# Altium footprint library standard-case.PcbLib: 206 footprints (part 1 of 13)
Each footprint in its own frame and in the unit in brackets; x right, y up, seen from the top. Pads: shape width x height; smd on the part's side, far side on the other; paste and mask are expansions set on the pad; w line width, h text height; cw(c..) or ccw(c..) is an arc to the next point about the centre after c.
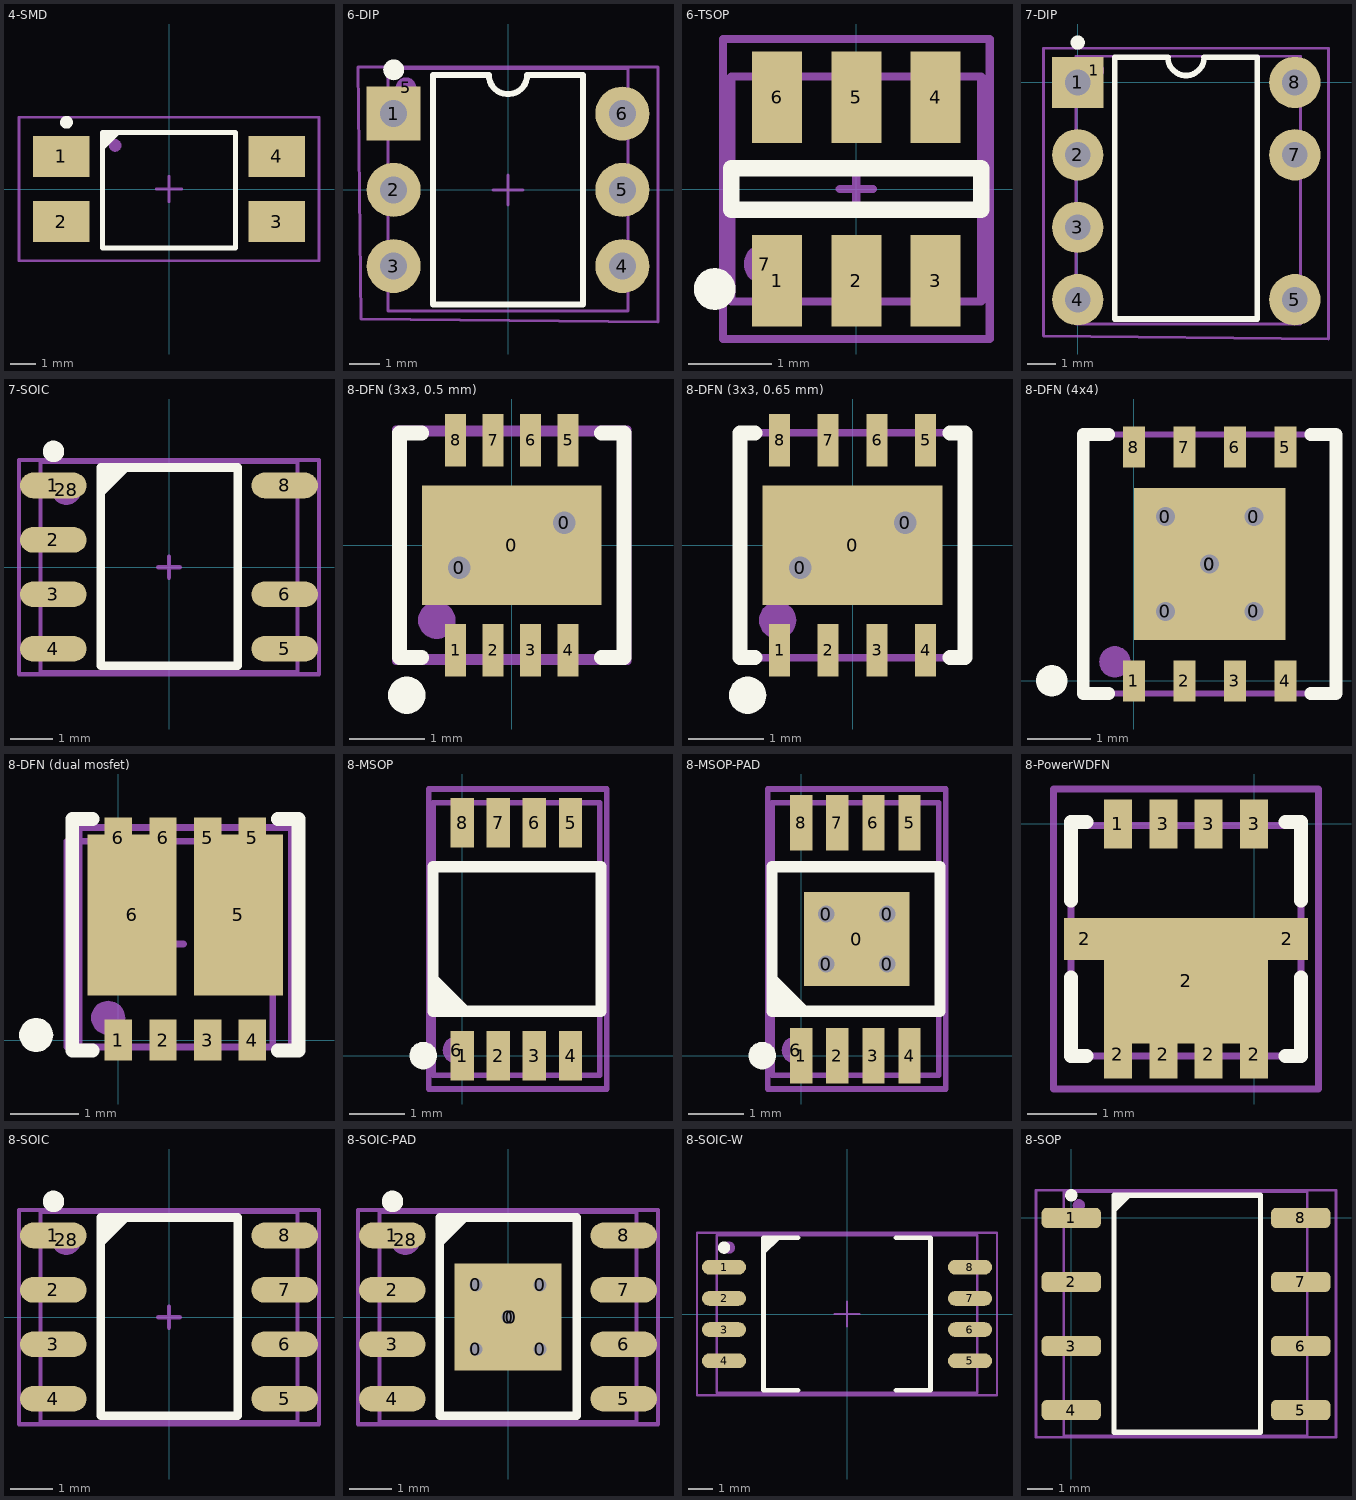
[diagram p0: the footprints below, top view; thin cyan lines are the x and y axes]

## 4-SMD [mm] "SOIC, 4-Leads, Body 4,60x6,50mm, Pitch 1,27mm, IPC Medium Density"
height 4
pads (5):
  rect 2.2x1.6 smd: 1(-4.2,1.27) 2(-4.2,-1.27) 3(4.2,-1.27) 4(4.2,1.27)
  round 0.5 on Mech1: ""(-2.1,1.7)
Top Overlay:
  circle w0.25: c-4,2.6 r0.125
  region: -2.6,2.2 -2.6,1.48 -1.88,2.2
  lines w0.2: -2.6,-2.3 2.6,-2.3 2.6,2.2 -2.6,2.2 -2.6,-2.3
Mechanical 1:
  lines w0.1: -2.6,-2.3 2.6,-2.3 2.6,2.2 -2.6,2.2 -2.6,-2.3
Mechanical 15:
  lines w0.1: -0.5,0 0.5,0 ; 0,-0.5 0,0.5 ; -5.85,-2.8 5.85,-2.8 5.85,2.8 -5.85,2.8 -5.85,-2.8
3D body "PC817 Gullwing Assembly.STEP": height 3.75, standoff -0.1, extent -5,-2.28 5,2.3

## 6-DIP [mm] "pitch 2.54 mm"
height 5.6
pads (8):
  rect 1.8x1.8 hole 0.9: 1(-3.81,2.54)
  round 1.8 hole 0.9: 2(-3.81,0) 3(-3.81,-2.54) 4(3.81,-2.54) 5(3.81,0) 6(3.81,2.54)
  round 0.7 on Mech1: 5(-3.4,3.4)
  round 0.7 on Top Overlay: ""(-3.81,4)
Top Overlay:
  lines w0.2: -2.5,-3.82 -2.5,3.82 -0.635,3.82 ccw(c0,3.82) 0.635,3.82 2.5,3.82 2.5,-3.82 -2.5,-3.82
Mechanical 1:
  lines w0.1: -4,-4.04 -4,4.04 4,4.04 4,-4.04 -4,-4.04
Mechanical 15:
  lines w0.1: -0.5,0 0.5,0 ; 0,-0.5 0,0.5 ; -5,4.1 -4.9,-4.3 5,-4.4 5,4.1 -5,4.1
3D body "CircuitWorks-DIP6.step": height 4.31, standoff -3.28, extent -4,-4.04 4,4.04

## 6-TSOP [mm] "pitch 0.95 mm"
pads (7):
  rect 0.6x1.1 smd: 1(-0.95,-1.1) 2(0,-1.1) 3(0.95,-1.1) 4(0.95,1.1) 5(0,1.1) 6(-0.95,1.1)
  round 0.5 on Mech1: 7(-1.1,-0.9)
Top Overlay:
  circle w0.25: c-1.7,-1.2 r0.125
  lines w0.2: -1.5,-0.25 1.5,-0.25 1.5,0.25 -1.5,0.25 -1.5,-0.25
Mechanical 1:
  lines w0.1: -1.5,-1.35 -1.5,1.35 1.5,1.35 1.5,-1.35 -1.5,-1.35
Mechanical 15:
  lines w0.1: -0.2,0 0.2,0 ; 0,-0.2 0,0.2 ; -1.6,-1.8 1.6,-1.8 1.6,1.8 -1.6,1.8 -1.6,-1.8
3D body "User Library-TSOP-6.STEP": height 1, standoff 0, extent -1.5,-1.35 1.5,1.35

## 7-DIP [mm] "pitch 2.54 mm"
height 5.08
pads (8):
  rect 1.8x1.8 hole 0.9: 1(0,0)
  round 0.7 on Mech1: 1(0.58,0.42)
  round 1.8 hole 0.9: 2(0,-2.54) 3(0,-5.08) 4(0,-7.62) 5(7.62,-7.62) 7(7.62,-2.54) 8(7.62,0)
Top Overlay:
  circle w0.25: c0,1.4 r0.125
  lines w0.2: 1.3,-8.3 6.3,-8.3 6.3,0.88 4.435,0.88 cw(c3.8,0.88) 3.165,0.88 1.3,0.88 1.3,-8.3
Mechanical 1:
  lines w0.1: -0.055,-8.48 7.815,-8.48 7.815,0.92 -0.055,0.92 -0.055,-8.48
Mechanical 15:
  lines w0.1: -1.2,-8.9 -1.2,-0.5 -1.2,1.2 8.8,1.2 8.8,-6.6 8.8,-9 -1.2,-8.9
3D body "DIP-7 (VIPER28).stp": height 4.36, standoff -3, extent -0.035,-8.5 7.835,0.9

## 7-SOIC [mm] "pitch 1.27 mm"
height 5.08
pads (8):
  rrect100% 1.55x0.6 smd: 1(-2.7,1.905) 2(-2.7,0.635) 3(-2.7,-0.635) 4(-2.7,-1.905) 5(2.7,-1.905) 6(2.7,-0.635) 8(2.7,1.905)
  round 0.7 on Mech1: 28(-2.395,1.8)
Top Overlay:
  circle w0.25: c-2.695,2.7 r0.125
  region: -1.595,2.325 -1.595,1.605 -0.875,2.325
  lines w0.2: -1.595,-2.3 -1.595,2.325 1.605,2.325 1.605,-2.3 -1.595,-2.3
Mechanical 1:
  lines w0.1: -3,-2.45 3,-2.45 3,2.45 -3,2.45 -3,-2.45
Mechanical 15:
  lines w0.1: -0.25,0 0.25,0 ; 0,-0.25 0,0.25 ; -3.5,-2.5 3.5,-2.5 3.5,2.5 -3.5,2.5 -3.5,-2.5
3D body "User Library-SOIC-8-1.STEP": height 1.75, standoff 0, extent -3,-2.45 3,2.45

## 8-DFN (3x3, 0.5 mm) [mm] "3x3 mm, pitch 0.5 mm, power pad"
height 0.75
pads (13):
  round 0.7 hole 0.3: 0(-0.7,-0.3) 0(0.7,0.3)
  rect 2.4x1.6 smd mask+0.05: 0(0,0)
  rect 0.28x0.7 smd mask+0.05: 1(-0.75,-1.4) 2(-0.25,-1.4) 3(0.25,-1.4) 4(0.75,-1.4) 5(0.75,1.4) 6(0.25,1.4) 7(-0.25,1.4) 8(-0.75,1.4)
  round 0.5 on Top Overlay mask+0.05: ""(-1.4,-2)
  round 0.5 on Mech1 mask+0.05: ""(-1,-1)
Top Overlay:
  lines w0.2: -1.2,-1.5 -1.5,-1.5 -1.5,1.5 -1.2,1.5 ; 1.2,-1.5 1.5,-1.5 1.5,1.5 1.2,1.5
Mechanical 1:
  lines w0.1: -1.55,-1.55 1.55,-1.55 1.55,1.55 -1.55,1.55 -1.55,-1.55
Mechanical 15:
  lines w0.1: -0.2,0 0.2,0 ; 0,-0.2 0,0.2 ; -1.5,-1.5 -1.5,1.5 1.5,1.5 1.5,-1.5 -1.5,-1.5
3D body "User Library-My-DFN-8-3x3-0_5.STEP": height 0.8, standoff 0, extent -1.55,-1.56 1.55,1.56

## 8-DFN (3x3, 0.65 mm) [mm] "3x3 mm, pitch 0.65 mm, power pad"
height 0.75
pads (13):
  round 0.7 hole 0.3: 0(-0.7,-0.3) 0(0.7,0.3)
  rect 2.4x1.6 smd mask+0.05: 0(0,0)
  rect 0.28x0.7 smd mask+0.05: 1(-0.975,-1.4) 2(-0.325,-1.4) 3(0.325,-1.4) 4(0.975,-1.4) 5(0.975,1.4) 6(0.325,1.4) 7(-0.325,1.4) 8(-0.975,1.4)
  round 0.5 on Top Overlay mask+0.05: ""(-1.4,-2)
  round 0.5 on Mech1 mask+0.05: ""(-1,-1)
Top Overlay:
  lines w0.2: -1.3,-1.5 -1.5,-1.5 -1.5,1.5 -1.3,1.5 ; 1.3,-1.5 1.5,-1.5 1.5,1.5 1.3,1.5
Mechanical 1:
  lines w0.1: -1.495,-1.5 -1.495,1.5 1.495,1.5 1.495,-1.5 -1.495,-1.5
Mechanical 15:
  lines w0.1: -0.2,0 0.2,0 ; 0,-0.2 0,0.2 ; -1.5,-1.5 -1.5,1.5 1.5,1.5 1.5,-1.5 -1.5,-1.5
3D body "User Library-DFN8N_65.STEP": height 0.9, standoff 0, extent -1.495,-1.5 1.495,1.5

## 8-DFN (4х4) [mm] "4x4 mm, pitch 0.8 mm, power pad"
height 0.9
pads (16):
  round 0.7 hole 0.3: 0(0.5,1.1) 0(0.5,2.6) 0(1.2,1.85) 0(1.9,1.1) 0(1.9,2.6)
  rect 2.4x2.4 smd: 0(1.2,1.85)
  rect 0.35x0.65 smd: 1(0,0) 2(0.8,0) 3(1.6,0) 4(2.4,0) 5(2.4,3.7) 6(1.6,3.7) 7(0.8,3.7) 8(0,3.7)
  round 0.5 on Top Overlay: ""(-1.3,0)
  round 0.5 on Mech1: ""(-0.3,0.3)
Top Overlay:
  lines w0.2: -0.4,-0.2 -0.8,-0.2 -0.8,3.9 -0.4,3.9 ; 2.8,-0.2 3.2,-0.2 3.2,3.9 2.8,3.9
Mechanical 1:
  lines w0.1: -0.8,-0.2 3.2,-0.2 3.2,3.9 -0.8,3.9 -0.8,-0.2
Mechanical 15:
  lines w0.1: -0.8,-0.2 3.2,-0.2 3.2,3.9 -0.8,3.9 -0.8,-0.2
3D body "User Library-DFN8 Body 4x4 Pitch 0_8mm.STEP": height 0.97, standoff -0.03, extent -0.8,-0.2 3.2,3.9

## 8-DFN (dual mosfet) [mm] "3x3 mm, pitch 0.65 mm"
height 0.75
pads (12):
  rect 0.4x0.6 smd mask+0.05: 1(0,0) 2(0.65,0) 3(1.3,0) 4(1.95,0) 5(1.3,2.95) 5(1.95,2.95) 6(0,2.95) 6(0.65,2.95)
  rect 1.3x2.35 smd: 5(1.75,1.825) 6(0.2,1.825)
  round 0.5 on Top Overlay mask+0.05: ""(-1.2,0.075)
  round 0.5 on Mech1 mask+0.05: ""(-0.15,0.325)
Top Overlay:
  lines w0.2: -0.375,-0.15 -0.675,-0.15 -0.675,3.225 -0.375,3.225 ; 2.325,-0.15 2.625,-0.15 2.625,3.225 2.325,3.225
Mechanical 1:
  lines w0.1: -0.575,-0.1 -0.575,3.1 2.525,3.1 2.525,-0.1 -0.575,-0.1
Mechanical 15:
  lines w0.1: 0.55,1.4 0.95,1.4 ; 0.75,1.2 0.75,1.6 ; -0.75,-0.1 2.25,-0.1 2.25,2.9 -0.75,2.9 -0.75,-0.1
3D body "User Library-DFN8_3x3_0_65Pitch.STEP": height 0.8, standoff 0, extent -0.575,-0.1 2.525,3.1

## 8-MSOP [mm] "pitch 0.65 mm"
pads (10):
  rect 0.42x0.89 smd: 1(0,0) 2(0.65,0) 3(1.3,0) 4(1.95,0) 5(1.95,4.19) 6(1.3,4.19) 7(0.65,4.19) 8(0,4.19)
  round 0.5 on Mech1: 6(-0.1,0.1)
  round 0.5 on Top Overlay: ""(-0.7,0)
Top Overlay:
  region: -0.525,0.8 0.195,0.8 -0.525,1.52
  lines w0.2: -0.525,0.8 -0.525,3.4 2.5,3.4 2.5,0.8 -0.525,0.8
Mechanical 1:
  lines w0.1: -0.525,-0.35 2.475,-0.35 2.475,4.55 -0.525,4.55 -0.525,-0.35
Mechanical 15:
  lines w0.1: -0.6,-0.6 -0.6,4.8 2.6,4.8 2.6,3.3 2.6,-0.6 -0.6,-0.6
3D body "User Library-msop-8.STEP": height 1.15, standoff 0, extent -0.525,-0.35 2.475,4.55

## 8-MSOP-PAD [mm] "pitch 0.65 mm, power pad"
pads (15):
  round 0.7 hole 0.3: 0(0.45,1.65) 0(0.45,2.55) 0(1.55,1.65) 0(1.55,2.55)
  rect 1.9x1.7 smd: 0(1,2.1)
  rect 0.4x1 smd: 1(0,0) 2(0.65,0) 3(1.3,0) 4(1.95,0) 5(1.95,4.19) 6(1.3,4.19) 7(0.65,4.19) 8(0,4.19)
  round 0.5 on Mech1: 6(-0.1,0.1)
  round 0.5 on Top Overlay: ""(-0.7,0)
Top Overlay:
  region: -0.525,0.8 0.195,0.8 -0.525,1.52
  lines w0.2: -0.525,0.8 2.5,0.8 2.5,3.4 -0.525,3.4 -0.525,0.8
Mechanical 1:
  lines w0.1: -0.525,-0.35 -0.525,4.55 2.475,4.55 2.475,-0.35 -0.525,-0.35
Mechanical 15:
  lines w0.1: -0.6,-0.6 2.6,-0.6 2.6,3.3 2.6,4.8 -0.6,4.8 -0.6,-0.6
3D body "User Library-msop-8.STEP": height 1.15, standoff 0, extent -0.525,-0.35 2.475,4.55

## 8-PowerWDFN [mm]
pads (11):
  rect 0.4x0.7 smd: 1(-1.95,0) 2(-1.95,-3.3) 2(-1.3,-3.3) 2(-0.65,-3.3) 2(0,-3.3) 3(-1.3,0) 3(-0.65,0) 3(0,0)
  rect 0.6x0.6 smd: 2(-2.425,-1.65) 2(0.475,-1.65)
  rect 2.35x1.8 smd: 2(-0.975,-2.25)
Top Overlay:
  lines w0.2: -2.625,-2.2 -2.625,-3.325 -2.4,-3.325 ; -2.625,-1.1 -2.625,0.025 -2.4,0.025 ; 0.45,-3.325 0.675,-3.325 0.675,-2.2 ; 0.45,0.025 0.675,0.025 0.675,-1.1
Mechanical 1:
  lines w0.1: -2.625,-3.325 -2.625,-0.025 0.675,-0.025 0.675,-3.325 -2.625,-3.325
Mechanical 15:
  lines w0.1: -2.875,-3.8 0.925,-3.8 0.925,0.5 -2.875,0.5 -2.875,-3.8
3D body "WDFN8.STEP": height 0.7, standoff -0.01, extent -2.625,-3.325 0.675,-0.025

## 8-SOIC [mm] "pitch 1.27 mm"
pads (9):
  rrect100% 1.55x0.6 smd: 1(-2.7,1.905) 2(-2.7,0.635) 3(-2.7,-0.635) 4(-2.7,-1.905) 5(2.7,-1.905) 6(2.7,-0.635) 7(2.7,0.635) 8(2.7,1.905)
  round 0.7 on Mech1: 28(-2.395,1.8)
Top Overlay:
  circle w0.25: c-2.695,2.7 r0.125
  region: -1.595,2.325 -1.595,1.605 -0.875,2.325
  lines w0.2: -1.595,-2.3 -1.595,2.325 1.605,2.325 1.605,-2.3 -1.595,-2.3
Mechanical 1:
  lines w0.1: -3,-2.45 3,-2.45 3,2.45 -3,2.45 -3,-2.45
Mechanical 15:
  lines w0.1: -0.25,0 0.25,0 ; 0,-0.25 0,0.25 ; -3.5,-2.5 3.5,-2.5 3.5,2.5 -3.5,2.5 -3.5,-2.5
3D body "User Library-SOIC-8-1.STEP": height 1.75, standoff 0, extent -3,-2.45 3,2.45

## 8-SOIC-PAD [mm] "pitch 1.27 mm, power pad"
pads (15):
  round 0.7 hole 0.3: 0(-0.75,-0.75) 0(-0.75,0.75) 0(0,0) 0(0.75,-0.75) 0(0.75,0.75)
  rrect100% 1.55x0.6 smd: 1(-2.7,1.905) 2(-2.7,0.635) 3(-2.7,-0.635) 4(-2.7,-1.905) 5(2.7,-1.905) 6(2.7,-0.635) 7(2.7,0.635) 8(2.7,1.905)
  round 0.7 on Mech1: 28(-2.395,1.8)
  rect 2.5x2.5 smd: " 0"(0,0)
Top Overlay:
  circle w0.25: c-2.695,2.7 r0.125
  region: -1.595,2.325 -1.595,1.605 -0.875,2.325
  lines w0.2: -1.595,-2.3 1.605,-2.3 1.605,2.325 -1.595,2.325 -1.595,-2.3
Mechanical 1:
  lines w0.1: -3,-2.45 -3,2.45 3,2.45 3,-2.45 -3,-2.45
Mechanical 15:
  lines w0.1: -0.25,0 0.25,0 ; 0,-0.25 0,0.25 ; -3.5,-2.5 -3.5,2.5 3.5,2.5 3.5,-2.5 -3.5,-2.5
3D body "User Library-SOIC-8-1.STEP": height 1.75, standoff 0, extent -3,-2.45 3,2.45

## 8-SOIC-W [mm] "pitch 1.27 mm, isolator"
pads (9):
  oval 1.8x0.6 smd: 1(-5,1.905) 2(-5,0.635) 3(-5,-0.635) 4(-5,-1.905) 5(5,-1.905) 6(5,-0.635) 7(5,0.635) 8(5,1.905)
  round 0.5 on Mech1: ""(-4.8,2.7)
Top Overlay:
  circle w0.25: c-5,2.7 r0.125
  region: -3.4,3.1 -3.4,2.38 -2.68,3.1
  lines w0.2: -2,-3.1 -3.4,-3.1 -3.4,3.1 -2,3.1 ; 2,-3.1 3.4,-3.1 3.4,3.1 2,3.1
Mechanical 1:
  lines w0.1: -5.3,-3.2 5.3,-3.2 5.3,3.2 -5.3,3.2 -5.3,-3.2
Mechanical 15:
  lines w0.1: -0.5,0 0.5,0 ; 0,-0.5 0,0.5 ; -6.1,-3.3 -6.1,3.3 6.1,3.3 6.1,-3.3 -6.1,-3.3
3D body "1EDC60I12AHXUMA1.STEP": height 1.7, standoff 0, extent -5.321,-3.18 5.321,3.17

## 8-SOP [mm] "pitch 2.54 mm"
pads (10):
  rrect50% 2.35x0.8 smd: 1(0,0) 2(0,-2.54) 3(0,-5.08) 4(0,-7.62) 5(9.1,-7.62) 6(9.1,-5.08) 7(9.1,-2.54) 8(9.1,0)
  round 0.5 on Top Overlay: ""(0,0.9)
  round 0.5 on Mech1: ""(0.3,0.5)
Top Overlay:
  region: 1.7,0.9 1.7,0.18 2.42,0.9
  lines w0.2: 1.7,-8.5 7.5,-8.5 7.5,0.9 1.7,0.9 1.7,-8.5
Mechanical 1:
  lines w0.1: -0.3,-8.63 9.36,-8.63 9.36,1.03 -0.3,1.03 -0.3,-8.63
Mechanical 15:
  lines w0.1: -1.4,-8.7 10.5,-8.7 10.5,1.1 -1.4,1.1 -1.4,-8.7
3D body "3120.STEP": height 4.79, standoff 0, extent -0.3,-8.63 9.36,1.03